# Altium footprint library WR-MJ.PcbLib: 84 footprints (part 4 of 6)
Each footprint in its own frame and in the unit in brackets; x right, y up, seen from the top. Pads: shape width x height; smd on the part's side, far side on the other; paste and mask are expansions set on the pad; w line width, h text height; cw(c..) or ccw(c..) is an arc to the next point about the centre after c.
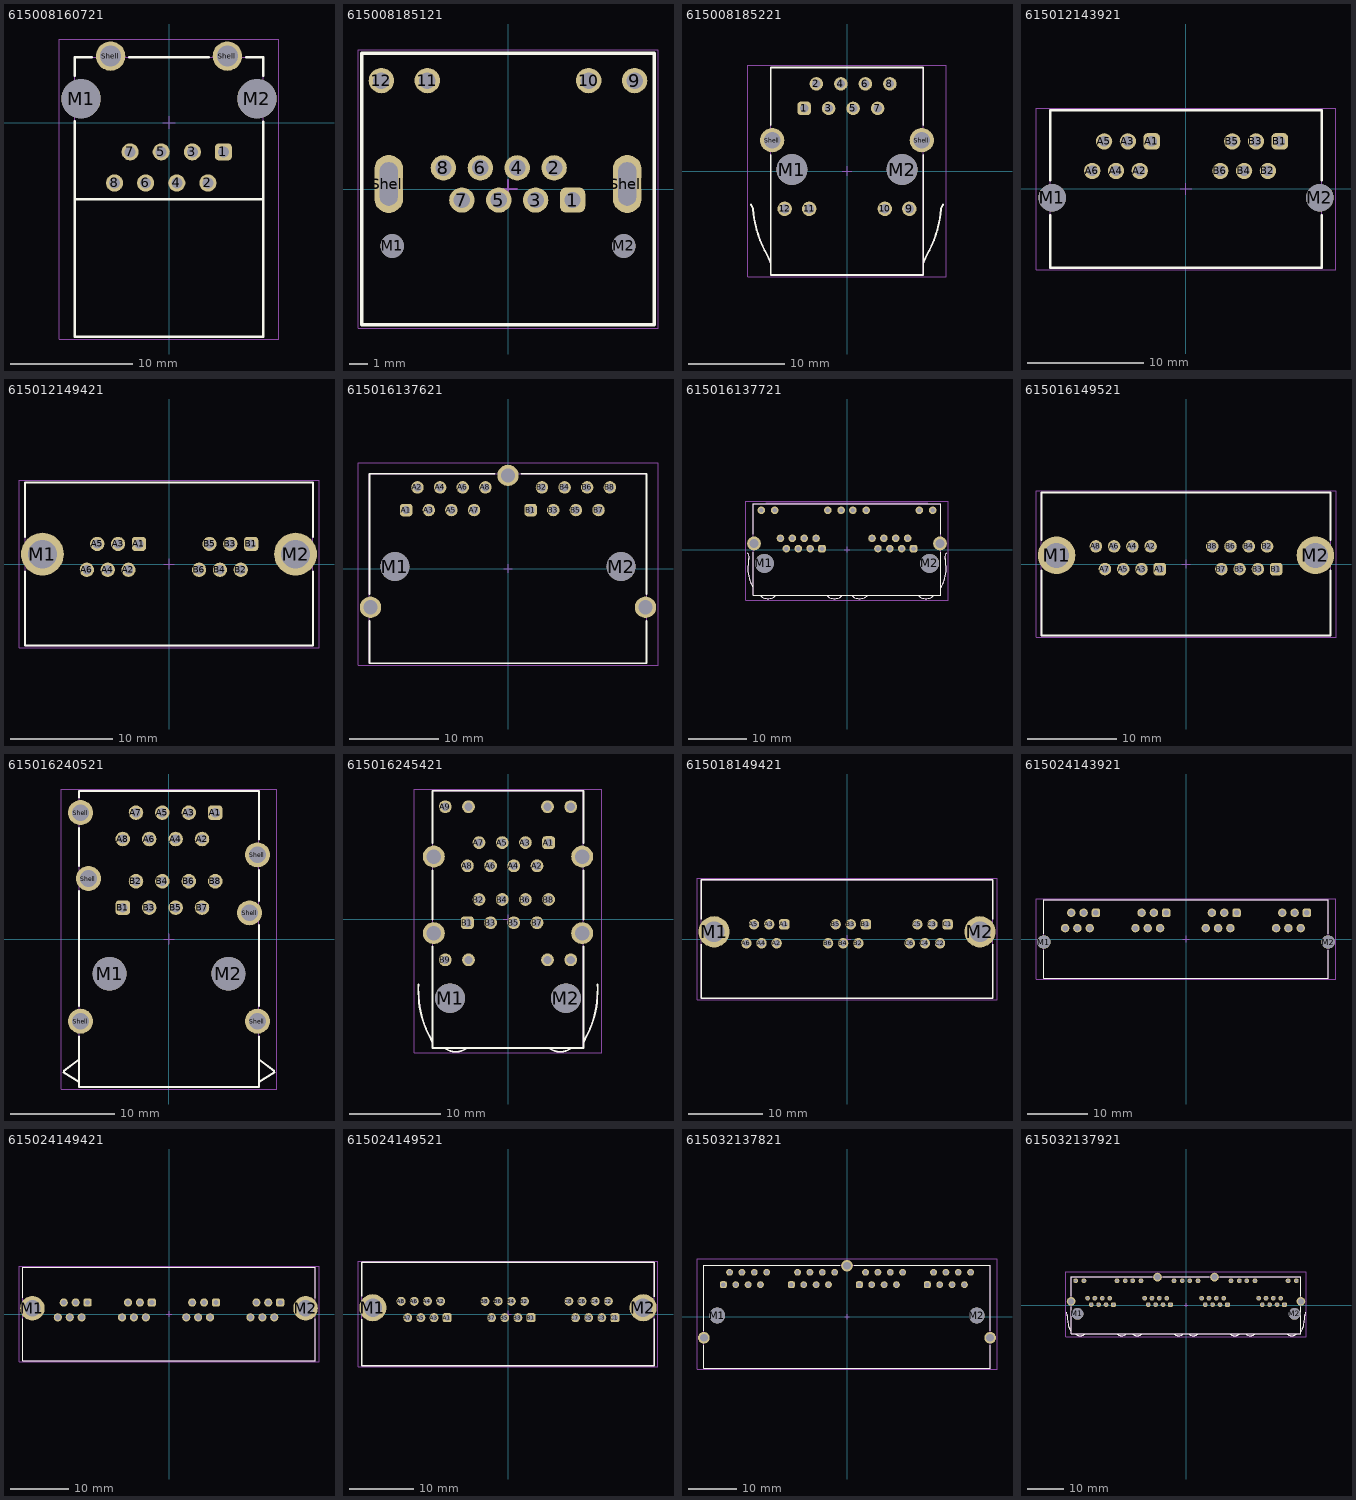
[diagram p3: the footprints below, top view; thin cyan lines are the x and y axes]

## 615008160721 [mm] "Modular Jack THT 47.5deg Shielded"
height 16
pads (12):
  rrect50% 1.4x1.4 hole 0.9: 1(4.445,-2.4)
  round 1.4 hole 0.9: 2(3.175,-4.94) 3(1.905,-2.4) 4(0.635,-4.94) 5(-0.635,-2.4) 6(-1.905,-4.94) 7(-3.175,-2.4) 8(-4.445,-4.94)
  round 3.2 hole 3.2 unplated: M1(-7.175,1.94) M2(7.175,1.94)
  round 2.4 hole 1.7: Shell(-4.765,5.42) Shell(4.765,5.42)
Top Overlay:
  lines w0.2: -7.7,-6.25 7.7,-6.25 ; -7.7,0.1 -7.7,-17.48 7.7,-17.48 7.7,0.05 ; -7.7,3.8 -7.7,5.34 -6.3,5.34 ; -3.25,5.34 3.25,5.34 ; 6.3,5.34 7.7,5.34 7.7,3.8
Top Assembly:
  lines w0.1: -7.7,-6.25 7.7,-6.25 ; -7.7,-17.48 -7.7,5.34 7.7,5.34 7.7,-17.48 -7.7,-17.48
Top Designator:
  text ".Designator" at -3.647,-0.357 h1
Top Courtyard:
  lines w0.05: -8.975,-17.68 8.975,-17.68 8.975,6.82 -8.975,6.82 -8.975,-17.68
Top Component Center:
  lines w0.1: -0.5,0 0.5,0 ; 0,-0.5 0,0.5
3D body "615008160721.stp": height 23.17, standoff -3.11, extent -8.02,-17.48 8.02,5.561

## 615008185121 [mm] "Modular Jack Horizontal Shielded  Low Profile with LED 8P8C Tab Up"
height 11.45
pads (16):
  rrect50% 1.4x1.4 hole 0.9: 1(3.57,-0.61)
  round 1.4 hole 0.9: 2(2.55,1.17) 3(1.53,-0.61) 4(0.51,1.17) 5(-0.51,-0.61) 6(-1.53,1.17) 7(-2.55,-0.61) 8(-3.57,1.17) 9(7,5.99) 10(4.46,5.99) 11(-4.46,5.99) 12(-7,5.99)
  round 1.3 hole 1.3 unplated: M1(-6.4,-3.15) M2(6.4,-3.15)
  oval 1.6x3.2 hole 1 slot 2.4 at 90 deg: Shell(-6.59,0.28) Shell(6.59,0.28)
Top Overlay:
  lines w0.2: -8.09,-7.5 8.09,-7.5 8.09,7.5 -8.09,7.5 -8.09,-7.5
Top Assembly:
  lines w0.1: -8.09,-7.5 -8.09,7.5 8.09,7.5 8.09,-7.5 -8.09,-7.5
Top Designator:
  text ".Designator" at -3.647,-0.357 h1
Top Courtyard:
  lines w0.05: -8.29,-7.7 -8.29,7.7 8.29,7.7 8.29,-7.7 -8.29,-7.7
Top Component Center:
  lines w0.1: -0.5,0 0.5,0 ; 0,-0.5 0,0.5
3D body "615008185121 (rev1).stp": height 11.35, standoff -2.35, extent -8.12,-7.5 8.12,7.5

## 615008185221 [mm] "Modular Jack Horizontal Shielded  with LED and EMI Panel Finger  8P8C Tab Down"
height 13.8
pads (16):
  rrect50% 1.4x1.4 hole 0.9: 1(-4.445,6.5)
  round 1.4 hole 0.9: 2(-3.175,9.04) 3(-1.905,6.5) 4(-0.635,9.04) 5(0.635,6.5) 6(1.905,9.04) 7(3.175,6.5) 8(4.445,9.04)
  round 1.5 hole 1: 9(6.465,-3.91) 10(3.925,-3.91) 11(-3.925,-3.91) 12(-6.465,-3.91)
  round 3.2 hole 3.2 unplated: M1(-5.715,0.15) M2(5.715,0.15)
  round 2.5 hole 1.7: Shell(-7.75,3.2) Shell(7.75,3.2)
Top Overlay:
  lines w0.2: -9.97,-3.474 cw(c-10.499,-3.994) -9.764,-3.889 ; -9.761,-3.889 ccw(c1.953,-2.907) -8.264,-8.721 cw(c-11.647,-10.654) -7.9,-9.585 ; -7.9,1.65 -7.9,-10.75 7.9,-10.75 7.9,1.65 ; -7.9,4.75 -7.9,10.75 7.9,10.75 7.9,4.75 ; 7.9,-9.585 cw(c11.647,-10.654) 8.264,-8.721 ccw(c-1.953,-2.907) 9.761,-3.889 ; 9.764,-3.889 cw(c10.499,-3.994) 9.97,-3.474
Top Assembly:
  lines w0.1: -9.97,-3.474 cw(c-10.499,-3.994) -9.764,-3.889 ; -9.761,-3.889 ccw(c1.953,-2.907) -8.264,-8.721 cw(c-11.647,-10.654) -7.9,-9.585 ; 7.9,-9.585 cw(c11.647,-10.654) 8.264,-8.721 ccw(c-1.953,-2.907) 9.761,-3.889 ; 9.764,-3.889 cw(c10.499,-3.994) 9.97,-3.474 ; -7.9,-10.75 7.9,-10.75 7.9,10.75 -7.9,10.75 -7.9,-10.75
Top Designator:
  text ".Designator" at -3.647,-0.357 h1
Top Courtyard:
  lines w0.05: -10.3,-10.95 -10.3,10.95 10.3,10.95 10.3,-10.95 -10.3,-10.95
Top Component Center:
  lines w0.1: -0.5,0 0.5,0 ; 0,-0.5 0,0.5
3D body "615008185221 (rev1).stp": height 15.84, standoff -3.31, extent -10.1,-10.75 10.1,10.75

## 615012143921 [mm] "Modular Jack THT Horizontal Plastic Dual Port 6P6C Tab Up"
height 14
pads (14):
  rrect50% 1.4x1.4 hole 0.9: A1(-2.95,4.09) B1(8.05,4.09)
  round 1.4 hole 0.9: A2(-3.97,1.55) A3(-4.99,4.09) A4(-6.01,1.55) A5(-7.03,4.09) A6(-8.05,1.55) B2(7.03,1.55) B3(6.01,4.09) B4(4.99,1.55) B5(3.97,4.09) B6(2.95,1.55)
  round 2.36 hole 2.36 unplated: M1(-11.5,-0.75) M2(11.5,-0.75)
Top Overlay:
  lines w0.2: -11.65,-2.25 -11.65,-6.75 11.65,-6.75 11.65,-2.25 ; -11.65,0.75 -11.65,6.75 11.65,6.75 11.65,0.75
Top Assembly:
  lines w0.1: -11.65,-6.75 -11.65,6.75 11.65,6.75 11.65,-6.75 -11.65,-6.75
Top Designator:
  text ".Designator" at -3.647,-0.357 h1
Top Courtyard:
  lines w0.05: -12.88,-6.95 -12.88,6.95 12.88,6.95 12.88,-6.95 -12.88,-6.95
Top Component Center:
  lines w0.1: -0.5,0 0.5,0 ; 0,-0.5 0,0.5
3D body "615012143921.stp": height 14.3, standoff -3.3, extent -12.8,-6.75 12.8,6.75

## 615012149421 [mm] "Modular Jack Horizontal Plastic 6P6C Assembly Tab Up"
height 15.4
pads (14):
  rrect50% 1.4x1.4 hole 0.9: A1(-2.95,1.97) B1(8.05,1.97)
  round 1.4 hole 0.9: A2(-3.97,-0.57) A3(-4.99,1.97) A4(-6.01,-0.57) A5(-7.03,1.97) A6(-8.05,-0.57) B2(7.03,-0.57) B3(6.01,1.97) B4(4.99,-0.57) B5(3.97,1.97) B6(2.95,-0.57)
  round 4.2 hole 2.8: M1(-12.4,0.97) M2(12.4,0.97)
Top Overlay:
  lines w0.2: -14.1,-0.75 -14.1,-8 14.1,-8 14.1,-0.75 ; -14.1,2.65 -14.1,8 14.1,8 14.1,2.65
Top Assembly:
  lines w0.1: -14.1,-8 14.1,-8 14.1,8 -14.1,8 -14.1,-8
Top Designator:
  text ".Designator" at -3.647,-0.357 h1
Top Courtyard:
  lines w0.05: -14.7,-8.2 -14.7,8.2 14.7,8.2 14.7,-8.2 -14.7,-8.2
Top Component Center:
  lines w0.1: -0.5,0 0.5,0 ; 0,-0.5 0,0.5
3D body "615012149421 (rev1).stp": height 15.45, standoff -3.34, extent -14.045,-8 14.065,8

## 615016137621 [mm] "Modular Jack Horizontal Shielded Dual Port 8P8C Tab Down"
height 13.75
pads (21):
  rrect50% 1.4x1.4 hole 0.9: A1(-11.43,6.565) B1(2.54,6.565)
  round 1.4 hole 0.9: A2(-10.16,9.105) A3(-8.89,6.565) A4(-7.62,9.105) A5(-6.35,6.565) A6(-5.08,9.105) A7(-3.81,6.565) A8(-2.54,9.105) B2(3.81,9.105) B3(5.08,6.565) B4(6.35,9.105) B5(7.62,6.565) B6(8.89,9.105) B7(10.16,6.565) B8(11.43,9.105)
  round 3.25 hole 3.25 unplated: M1(-12.7,0.215) M2(12.7,0.215)
  round 2.4 hole 1.6: Shell(-15.435,-4.355) Shell(0,10.455) Shell(15.435,-4.355)
Top Overlay:
  lines w0.2: -15.56,-5.85 -15.56,-10.635 15.56,-10.635 15.56,-5.85 ; -15.56,-2.85 -15.56,10.635 -1.5,10.635 ; 1.5,10.635 15.56,10.635 15.56,-2.85
Top Assembly:
  lines w0.1: -15.56,-10.635 -15.56,10.635 15.56,10.635 15.56,-10.635 -15.56,-10.635
Top Designator:
  text ".Designator" at -3.647,-0.357 h1
Top Courtyard:
  lines w0.05: -16.835,-10.835 16.835,-10.835 16.835,11.855 -16.835,11.855 -16.835,-10.835
Top Component Center:
  lines w0.1: -0.5,0 0.5,0 ; 0,-0.5 0,0.5
3D body "615016137621 (rev1).stp": height 13.75, standoff -3.85, extent -15.565,-10.635 15.565,10.635

## 615016137721 [mm] "Modular Jack Horizontal Shielded Dual Port with EMI Panel Finger 8P8C Tab Up"
height 13.2
pads (28):
  rrect50% 1.3x1.3 hole 0.8: A1(-4.305,0.165) B1(11.445,0.165)
  round 1.3 hole 0.8: A2(-5.325,1.945) A3(-6.345,0.165) A4(-7.365,1.945) A5(-8.385,0.165) A6(-9.405,1.945) A7(-10.425,0.165) A8(-11.445,1.945) A9(-1.015,6.765) A10(-3.305,6.765) A11(-12.445,6.765) A12(-14.735,6.765) B2(10.425,1.945) B3(9.405,0.165) B4(8.385,1.945) B5(7.365,0.165) B6(6.345,1.945) B7(5.325,0.165) B8(4.305,1.945) B9(14.735,6.765) B10(12.445,6.765) B11(3.305,6.765) B12(1.015,6.765)
  round 3.25 hole 3.25 unplated: M1(-14.225,-2.375) M2(14.225,-2.375)
  round 2.4 hole 1.6: Shell(-16,1.055) Shell(16,1.055)
Top Overlay:
  lines w0.2: -17.078,-0.648 cw(c-17.673,-1.229) -16.889,-1.507 ccw(c-15.638,-1.952) -16.965,-1.91 ccw(c-13.103,-2.57) -17.021,-2.533 ccw(c-11.57,-3.319) -16.534,-5.704 cw(c-20.821,-8.25) -16.125,-6.575 ; -16.125,-0.5 -16.125,-7.875 16.125,-7.875 16.125,-0.5 ; -16.125,2.6 -16.125,7.875 16.125,7.875 16.125,2.6 ; -14.95,-7.875 ccw(c-13.585,-6.51) -12.22,-7.875 ; -3.52,-7.875 ccw(c-2.155,-6.51) -0.79,-7.875 ; 0.8,-7.875 ccw(c2.165,-6.51) 3.53,-7.875 ; 12.23,-7.875 ccw(c13.595,-6.51) 14.96,-7.875 ; 16.125,-6.575 cw(c20.821,-8.25) 16.534,-5.704 ccw(c11.57,-3.319) 17.021,-2.533 ccw(c13.103,-2.57) 16.965,-1.91 ccw(c15.638,-1.952) 16.889,-1.507 cw(c17.673,-1.229) 17.078,-0.648
Top Assembly:
  lines w0.1: -17.078,-0.648 cw(c-17.673,-1.229) -16.889,-1.507 ccw(c-15.638,-1.952) -16.965,-1.91 ccw(c-13.103,-2.57) -17.021,-2.533 ccw(c-11.57,-3.319) -16.534,-5.704 cw(c-20.821,-8.25) -16.125,-6.575 ; -14.95,-7.875 ccw(c-13.585,-6.51) -12.22,-7.875 ; -13.9,7.875 -13.9,8.075 13.9,8.075 13.9,7.875 ; -3.52,-7.875 ccw(c-2.155,-6.51) -0.79,-7.875 ; 0.8,-7.875 ccw(c2.165,-6.51) 3.53,-7.875 ; 12.23,-7.875 ccw(c13.595,-6.51) 14.96,-7.875 ; 16.125,-6.575 cw(c20.821,-8.25) 16.534,-5.704 ccw(c11.57,-3.319) 17.021,-2.533 ccw(c13.103,-2.57) 16.965,-1.91 ccw(c15.638,-1.952) 16.889,-1.507 cw(c17.673,-1.229) 17.078,-0.648 ; -16.125,-7.875 -16.125,7.875 16.125,7.875 16.125,-7.875 -16.125,-7.875
Top Designator:
  text ".Designator" at -3.647,-0.357 h1
Top Courtyard:
  lines w0.05: -17.4,-8.675 17.4,-8.675 17.4,8.275 -17.4,8.275 -17.4,-8.675
Top Component Center:
  lines w0.1: -0.5,0 0.5,0 ; 0,-0.5 0,0.5
3D body "615016137721 (rev1).stp": height 14.31, standoff -3.71, extent -17.189,-8.475 17.189,8.075

## 615016149521 [mm] "Modular Jack Horizontal Plastic 8P8C Assembly Tab Up"
height 15.4
pads (18):
  rrect50% 1.4x1.4 hole 0.9: A1(-2.93,-0.57) B1(10.07,-0.57)
  round 1.4 hole 0.9: A2(-3.95,1.97) A3(-4.97,-0.57) A4(-5.99,1.97) A5(-7.01,-0.57) A6(-8.03,1.97) A7(-9.05,-0.57) A8(-10.07,1.97) B2(9.05,1.97) B3(8.03,-0.57) B4(7.01,1.97) B5(5.99,-0.57) B6(4.97,1.97) B7(3.95,-0.57) B8(2.93,1.97)
  round 4.2 hole 2.8: M1(-14.45,0.97) M2(14.45,0.97)
Top Overlay:
  lines w0.2: -16.14,-0.7 -16.14,-8 16.14,-8 16.14,-0.7 ; -16.14,2.65 -16.14,8 16.14,8 16.14,2.65
Top Assembly:
  lines w0.1: -16.14,-8 16.14,-8 16.14,8 -16.14,8 -16.14,-8
Top Designator:
  text ".Designator" at -3.647,-0.357 h1
Top Courtyard:
  lines w0.05: -16.75,-8.2 -16.75,8.2 16.75,8.2 16.75,-8.2 -16.75,-8.2
Top Component Center:
  lines w0.1: -0.5,0 0.5,0 ; 0,-0.5 0,0.5
3D body "615016149521.stp": height 15.53, standoff -3.95, extent -16.14,-8 16.14,8

## 615016240521 [mm] "Modular Jack Horizontal Shielded Dual Stacked with EMI Panel Finger 8P8C Tab Up&Down"
height 25.2
pads (24):
  rrect50% 1.4x1.4 hole 0.9: A1(4.445,12.155) B1(-4.445,3.015)
  round 1.4 hole 0.9: A2(3.175,9.615) A3(1.905,12.155) A4(0.635,9.615) A5(-0.635,12.155) A6(-1.905,9.615) A7(-3.175,12.155) A8(-4.445,9.615) B2(-3.175,5.555) B3(-1.905,3.015) B4(-0.635,5.555) B5(0.635,3.015) B6(1.905,5.555) B7(3.175,3.015) B8(4.445,5.555)
  round 3.25 hole 3.25 unplated: M1(-5.715,-3.335) M2(5.715,-3.335)
  round 2.4 hole 1.6: Shell(-8.505,-7.905) Shell(-8.505,12.155) Shell(-7.745,5.815) Shell(7.745,2.515) Shell(8.505,-7.905) Shell(8.505,8.095)
Top Overlay:
  lines w0.2: -8.635,-13.755 -10.118,-12.828 -10.103,-12.702 -8.635,-11.555 ; -8.635,-9.375 -8.635,-14.225 8.635,-14.225 8.635,-9.375 ; -8.635,-6.435 -8.635,4.625 ; -8.635,7.005 -8.635,10.675 ; -8.635,13.635 -8.635,14.225 8.635,14.225 8.635,9.575 ; 8.635,-13.755 10.118,-12.828 10.103,-12.702 8.635,-11.555 ; 8.635,-6.425 8.635,1.355 ; 8.635,3.675 8.635,6.615
Top Assembly:
  lines w0.1: -8.635,-13.755 -10.118,-12.828 -10.103,-12.702 -8.635,-11.555 ; 8.635,-13.755 10.118,-12.828 10.103,-12.702 8.635,-11.555 ; -8.635,-14.225 -8.635,14.225 8.635,14.225 8.635,-14.225 -8.635,-14.225
Top Designator:
  text ".Designator" at -3.647,-0.357 h1
Top Courtyard:
  lines w0.05: -10.34,-14.425 -10.34,14.425 10.34,14.425 10.34,-14.425 -10.34,-14.425
Top Component Center:
  lines w0.1: -0.5,0 0.5,0 ; 0,-0.5 0,0.5
3D body "615016240521 (rev1).stp": height 25.27, standoff -4.08, extent -10.136,-14.225 10.136,14.225

## 615016245421 [mm] "Modular Jack Horizontal Shielded Dual Stacked with LED and EMI Panel Finger 8P8C Tab Up&Down"
height 25.4
pads (30):
  rrect50% 1.4x1.4 hole 0.89: A1(4.445,8.405) B1(-4.445,-0.365)
  round 1.4 hole 0.89: A2(3.175,5.865) A3(1.905,8.405) A4(0.635,5.865) A5(-0.635,8.405) A6(-1.905,5.865) A7(-3.175,8.405) A8(-4.445,5.865) A9(-6.865,12.335) A10(-4.32,12.335) A11(4.32,12.335) A12(6.865,12.335) B2(-3.175,2.175) B3(-1.905,-0.365) B4(-0.635,2.175) B5(0.635,-0.365) B6(1.905,2.175) B7(3.175,-0.365) B8(4.445,2.175) B9(-6.865,-4.425) B10(-4.32,-4.425) B11(4.32,-4.425) B12(6.865,-4.425)
  round 3.25 hole 3.25 unplated: M1(-6.345,-8.615) M2(6.345,-8.615)
  round 2.4 hole 1.57: Shell(-8.12,-1.505) Shell(-8.12,6.875) Shell(8.12,-1.505) Shell(8.12,6.875)
Top Overlay:
  lines w0.2: -9.804,-7.132 ccw(c-1.338,-7.631) -9.771,-8.534 ccw(c-0.082,-8.128) -8.542,-12.868 cw(c-11.997,-14.669) -8.25,-13.6 ; -8.25,-2.975 -8.25,-14.075 8.25,-14.075 8.25,-2.975 ; -8.25,-0.035 -8.25,5.375 ; -8.25,8.375 -8.25,14.075 8.25,14.075 8.25,8.375 ; -6.918,-14.074 ccw(c-5.71,-12.551) -4.503,-14.074 ; 4.503,-14.074 ccw(c5.71,-12.551) 6.918,-14.074 ; 8.25,-13.6 cw(c11.997,-14.669) 8.542,-12.868 ccw(c0.082,-8.128) 9.771,-8.534 ccw(c1.338,-7.631) 9.804,-7.132 ; 8.25,-0.035 8.25,5.375
Top Assembly:
  lines w0.1: -9.804,-7.132 ccw(c-1.338,-7.631) -9.771,-8.534 ccw(c-0.082,-8.128) -8.542,-12.868 cw(c-11.997,-14.669) -8.25,-13.6 ; -6.918,-14.074 ccw(c-5.71,-12.551) -4.503,-14.074 ; 4.503,-14.074 ccw(c5.71,-12.551) 6.918,-14.074 ; 8.25,-13.6 cw(c11.997,-14.669) 8.542,-12.868 ccw(c0.082,-8.128) 9.771,-8.534 ccw(c1.338,-7.631) 9.804,-7.132 ; -8.25,-14.075 8.25,-14.075 8.25,14.075 -8.25,14.075 -8.25,-14.075
Top Designator:
  text ".Designator" at -3.647,-0.357 h1
Top Courtyard:
  lines w0.05: -10.25,-14.6 -10.25,14.275 10.25,14.275 10.25,-14.6 -10.25,-14.6
Top Component Center:
  lines w0.1: -0.5,0 0.5,0 ; 0,-0.5 0,0.5
3D body "615016245421 (rev1).stp": height 27.25, standoff -3.64, extent -10.05,-14.365 10.05,14.075

## 615018149421 [mm] "Modular Jack Horizontal Plastic 6P6C Assembly Tab Up"
height 15.4
pads (20):
  rrect50% 1.4x1.4 hole 0.9: A1(-8.45,1.97) B1(2.55,1.97) C1(13.55,1.97)
  round 1.4 hole 0.9: A2(-9.47,-0.57) A3(-10.49,1.97) A4(-11.51,-0.57) A5(-12.53,1.97) A6(-13.55,-0.57) B2(1.53,-0.57) B3(0.51,1.97) B4(-0.51,-0.57) B5(-1.53,1.97) B6(-2.55,-0.57) C2(12.53,-0.57) C3(11.51,1.97) C4(10.49,-0.57) C5(9.47,1.97) C6(8.45,-0.57)
  round 4.2 hole 2.8: M1(-17.9,0.97) M2(17.9,0.97)
Top Overlay:
  lines w0.2: -19.6,-0.7 -19.6,-8 19.6,-8 19.6,-0.7 ; -19.6,2.65 -19.6,8 19.6,8 19.6,2.65
Top Assembly:
  lines w0.1: -19.6,-8 -19.6,8 19.6,8 19.6,-8 -19.6,-8
Top Designator:
  text ".Designator" at -3.647,-0.357 h1
Top Courtyard:
  lines w0.05: -20.2,-8.2 20.2,-8.2 20.2,8.2 -20.2,8.2 -20.2,-8.2
Top Component Center:
  lines w0.1: -0.5,0 0.5,0 ; 0,-0.5 0,0.5
3D body "615018149421 (rev1).stp": height 15.45, standoff -3.34, extent -19.545,-8 19.565,8

## 615024143921 [mm] "Modular Jack THT Horizontal Plastic 4Port 6P6C Tab Up"
height 14.55
pads (26):
  rrect50% 1.4x1.4 hole 0.9: A1(-14.925,4.34) B1(-3.275,4.34) C1(8.375,4.34) D1(20.025,4.34)
  round 1.4 hole 0.9: A2(-15.945,1.8) A3(-16.965,4.34) A4(-17.985,1.8) A5(-19.005,4.34) A6(-20.025,1.8) B2(-4.295,1.8) B3(-5.315,4.34) B4(-6.335,1.8) B5(-7.355,4.34) B6(-8.375,1.8) C2(7.355,1.8) C3(6.335,4.34) C4(5.315,1.8) C5(4.295,4.34) C6(3.275,1.8) D2(19.005,1.8) D3(17.985,4.34) D4(16.965,1.8) D5(15.945,4.34) D6(14.925,1.8)
  round 2.2 hole 2.2 unplated: M1(-23.55,-0.5) M2(23.55,-0.5)
Top Overlay:
  lines w0.2: -23.575,-1.9 -23.575,-6.5 23.575,-6.5 23.575,-1.9 ; -23.575,0.9 -23.575,6.5 23.575,6.5 23.575,0.9
Top Assembly:
  lines w0.1: -23.575,-6.5 -23.575,6.5 23.575,6.5 23.575,-6.5 -23.575,-6.5
Top Designator:
  text ".Designator" at -3.647,-0.357 h1
Top Courtyard:
  lines w0.05: -24.85,-6.7 24.85,-6.7 24.85,6.7 -24.85,6.7 -24.85,-6.7
Top Component Center:
  lines w0.1: -0.5,0 0.5,0 ; 0,-0.5 0,0.5
3D body "615024143921 (rev1).stp": height 14.67, standoff -3.08, extent -24.75,-6.5 24.75,6.5

## 615024149421 [mm] "Modular Jack Horizontal Plastic 6P6C Assembly Tab Up"
height 15.4
pads (26):
  rrect50% 1.4x1.4 hole 0.9: A1(-13.95,1.97) B1(-2.95,1.97) C1(8.05,1.97) D1(19.05,1.97)
  round 1.4 hole 0.9: A2(-14.97,-0.57) A3(-15.99,1.97) A4(-17.01,-0.57) A5(-18.03,1.97) A6(-19.05,-0.57) B2(-3.97,-0.57) B3(-4.99,1.97) B4(-6.01,-0.57) B5(-7.03,1.97) B6(-8.05,-0.57) C2(7.03,-0.57) C3(6.01,1.97) C4(4.99,-0.57) C5(3.97,1.97) C6(2.95,-0.57) D2(18.03,-0.57) D3(17.01,1.97) D4(15.99,-0.57) D5(14.97,1.97) D6(13.95,-0.57)
  round 4.2 hole 2.8: M1(-23.4,0.97) M2(23.4,0.97)
Top Overlay:
  lines w0.2: -25.1,-0.8 -25.1,-8 25.1,-8 25.1,-0.8 ; -25.1,2.75 -25.1,8 25.1,8 25.1,2.7
Top Assembly:
  lines w0.1: -25.1,-8 25.1,-8 25.1,8 -25.1,8 -25.1,-8
Top Designator:
  text ".Designator" at -3.647,-0.357 h1
Top Courtyard:
  lines w0.05: -25.7,-8.2 -25.7,8.2 25.7,8.2 25.7,-8.2 -25.7,-8.2
Top Component Center:
  lines w0.1: -0.5,0 0.5,0 ; 0,-0.5 0,0.5
3D body "615024149421 (rev1).stp": height 15.45, standoff -3.34, extent -25.045,-8 25.065,8

## 615024149521 [mm] "Modular Jack Horizontal Plastic 8P8C Assembly Tab Up"
height 15.4
pads (26):
  rrect50% 1.4x1.4 hole 0.9: A1(-9.43,-0.57) B1(3.57,-0.57) C1(16.57,-0.57)
  round 1.4 hole 0.9: A2(-10.45,1.97) A3(-11.47,-0.57) A4(-12.49,1.97) A5(-13.51,-0.57) A6(-14.53,1.97) A7(-15.55,-0.57) A8(-16.57,1.97) B2(2.55,1.97) B3(1.53,-0.57) B4(0.51,1.97) B5(-0.51,-0.57) B6(-1.53,1.97) B7(-2.55,-0.57) B8(-3.57,1.97) C2(15.55,1.97) C3(14.53,-0.57) C4(13.51,1.97) C5(12.49,-0.57) C6(11.47,1.97) C7(10.45,-0.57) C8(9.43,1.97)
  round 4.2 hole 2.8: M1(-20.95,0.97) M2(20.95,0.97)
Top Overlay:
  lines w0.2: -22.64,-0.8 -22.64,-8 22.64,-8 22.64,-0.75 ; -22.64,2.75 -22.64,8 22.64,8 22.64,2.7
Top Assembly:
  lines w0.1: -22.64,-8 -22.64,8 22.64,8 22.64,-8 -22.64,-8
Top Designator:
  text ".Designator" at -3.647,-0.357 h1
Top Courtyard:
  lines w0.05: -23.25,-8.2 -23.25,8.2 23.25,8.2 23.25,-8.2 -23.25,-8.2
Top Component Center:
  lines w0.1: -0.5,0 0.5,0 ; 0,-0.5 0,0.5
3D body "615024149521 (rev1).stp": height 15.53, standoff -4.01, extent -22.64,-8 22.64,8

## 615032137821 [mm] "Modular Jack Horizontal Shielded Ganged 4 Ports 8P8C Tab Down"
height 13.5
pads (37):
  rrect50% 1.4x1.4 hole 0.9: A1(-25.4,6.58) B1(-11.43,6.58) C1(2.54,6.58) D1(16.51,6.58)
  round 1.4 hole 0.9: A2(-24.13,9.12) A3(-22.86,6.58) A4(-21.59,9.12) A5(-20.32,6.58) A6(-19.05,9.12) A7(-17.78,6.58) A8(-16.51,9.12) B2(-10.16,9.12) B3(-8.89,6.58) B4(-7.62,9.12) B5(-6.35,6.58) B6(-5.08,9.12) B7(-3.81,6.58) B8(-2.54,9.12) C2(3.81,9.12) C3(5.08,6.58) C4(6.35,9.12) C5(7.62,6.58) C6(8.89,9.12) C7(10.16,6.58) C8(11.43,9.12) D2(17.78,9.12) D3(19.05,6.58) D4(20.32,9.12) D5(21.59,6.58) D6(22.86,9.12) D7(24.13,6.58) D8(25.4,9.12)
  round 3.25 hole 3.25 unplated: M1(-26.67,0.23) M2(26.67,0.23)
  round 2.4 hole 1.6: Shell(-29.405,-4.34) Shell(0,10.47) Shell(29.405,-4.34)
Top Overlay:
  lines w0.2: -29.45,-5.82 -29.45,-10.57 29.45,-10.57 29.45,-5.82 ; -29.45,-2.86 -29.45,10.57 -1.5,10.57 ; 1.5,10.57 29.45,10.57 29.45,-2.86
Top Assembly:
  lines w0.1: -29.45,-10.57 -29.45,10.57 29.45,10.57 29.45,-10.57 -29.45,-10.57
Top Designator:
  text ".Designator" at -3.647,-0.357 h1
Top Courtyard:
  lines w0.05: -30.82,-10.77 30.82,-10.77 30.82,11.87 -30.82,11.87 -30.82,-10.77
Top Component Center:
  lines w0.1: -0.5,0 0.5,0 ; 0,-0.5 0,0.5
3D body "615032137821 (rev1).stp": height 13.7, standoff -4.8, extent -29.65,-10.57 29.65,10.57

## 615032137921 [mm] "Modular Jack Horizontal Shielded Ganged 4 Ports with LED and EMI Panel Finger 8P8C Tab Up"
height 13.25
pads (54):
  rrect50% 1.3x1.3 hole 0.8: A1(-20.055,0.125) B1(-4.305,0.125) C1(11.445,0.125) D1(27.195,0.125)
  round 1.3 hole 0.8: A2(-21.075,1.905) A3(-22.095,0.125) A4(-23.115,1.905) A5(-24.135,0.125) A6(-25.155,1.905) A7(-26.175,0.125) A8(-27.195,1.905) A9(-16.765,6.725) A10(-19.055,6.725) A11(-28.195,6.725) A12(-30.485,6.725) B2(-5.325,1.905) B3(-6.345,0.125) B4(-7.365,1.905) B5(-8.385,0.125) B6(-9.405,1.905) B7(-10.425,0.125) B8(-11.445,1.905) B9(-1.015,6.725) B10(-3.305,6.725) B11(-12.445,6.725) B12(-14.735,6.725) C2(10.425,1.905) C3(9.405,0.125) C4(8.385,1.905) C5(7.365,0.125) C6(6.345,1.905) C7(5.325,0.125) C8(4.305,1.905) C9(14.735,6.725) C10(12.445,6.725) C11(3.305,6.725) C12(1.015,6.725) D2(26.175,1.905) D3(25.155,0.125) D4(24.135,1.905) D5(23.115,0.125) D6(22.095,1.905) D7(21.075,0.125) D8(20.055,1.905) D9(30.485,6.725) D10(28.195,6.725) D11(19.055,6.725) D12(16.765,6.725)
  round 3.25 hole 3.25 unplated: M1(-29.975,-2.415) M2(29.975,-2.415)
  round 2.4 hole 1.6: Shell(-31.75,1.015) Shell(-7.875,7.745) Shell(7.875,7.745) Shell(31.75,1.015)
Top Overlay:
  lines w0.2: -32.974,-1.922 cw(c-35.604,-2.812) -32.835,-3.01 ccw(c-27.155,-3.233) -32.729,-4.348 ccw(c-25.166,-3.555) -32.164,-6.529 cw(c-36.451,-9.075) -31.755,-7.4 ; -31.755,-0.475 -31.755,-7.875 31.755,-7.875 31.755,-0.475 ; -31.755,2.505 -31.755,7.875 -9.355,7.875 ; -30.58,-7.875 ccw(c-29.215,-6.51) -27.85,-7.875 ; -19.15,-7.875 ccw(c-17.785,-6.51) -16.42,-7.875 ; -14.83,-7.875 ccw(c-13.465,-6.51) -12.1,-7.875 ; -6.395,7.875 6.395,7.875 ; -3.4,-7.875 ccw(c-2.035,-6.51) -0.67,-7.875 ; 0.67,-7.875 ccw(c2.035,-6.51) 3.4,-7.875 ; 9.355,7.875 31.755,7.875 31.755,2.505 ; 12.1,-7.875 ccw(c13.465,-6.51) 14.83,-7.875 ; 16.42,-7.875 ccw(c17.785,-6.51) 19.15,-7.875 ; 27.85,-7.875 ccw(c29.215,-6.51) 30.58,-7.875 ; 31.755,-7.4 cw(c36.451,-9.075) 32.164,-6.529 ccw(c25.166,-3.555) 32.729,-4.348 ccw(c27.155,-3.233) 32.835,-3.01 cw(c35.604,-2.812) 32.974,-1.922
Top Assembly:
  lines w0.1: -32.974,-1.922 cw(c-35.604,-2.812) -32.835,-3.01 ccw(c-27.155,-3.233) -32.729,-4.348 ccw(c-25.166,-3.555) -32.164,-6.529 cw(c-36.451,-9.075) -31.755,-7.4 ; -30.58,-7.875 ccw(c-29.215,-6.51) -27.85,-7.875 ; -19.15,-7.875 ccw(c-17.785,-6.51) -16.42,-7.875 ; -14.83,-7.875 ccw(c-13.465,-6.51) -12.1,-7.875 ; -3.4,-7.875 ccw(c-2.035,-6.51) -0.67,-7.875 ; 0.67,-7.875 ccw(c2.035,-6.51) 3.4,-7.875 ; 12.1,-7.875 ccw(c13.465,-6.51) 14.83,-7.875 ; 16.42,-7.875 ccw(c17.785,-6.51) 19.15,-7.875 ; 27.85,-7.875 ccw(c29.215,-6.51) 30.58,-7.875 ; 31.755,-7.4 cw(c36.451,-9.075) 32.164,-6.529 ccw(c25.166,-3.555) 32.729,-4.348 ccw(c27.155,-3.233) 32.835,-3.01 cw(c35.604,-2.812) 32.974,-1.922 ; -31.755,-7.875 31.755,-7.875 31.755,7.875 -31.755,7.875 -31.755,-7.875
Top Designator:
  text ".Designator" at -3.647,-0.357 h1
Top Courtyard:
  lines w0.05: -33.15,-8.74 -33.15,9.145 33.15,9.145 33.15,-8.74 -33.15,-8.74
Top Component Center:
  lines w0.1: -0.5,0 0.5,0 ; 0,-0.5 0,0.5
3D body "615032137921 (rev1).stp": height 14.82, standoff -3.3, extent -33.065,-8.54 33.065,8.05